# Altium footprint library Orion-Bridge.PcbLib: 20 footprints (part 1 of 2)
Each footprint in its own frame and in the unit in brackets; x right, y up, seen from the top. Pads: shape width x height; smd on the part's side, far side on the other; paste and mask are expansions set on the pad; w line width, h text height; cw(c..) or ccw(c..) is an arc to the next point about the centre after c.
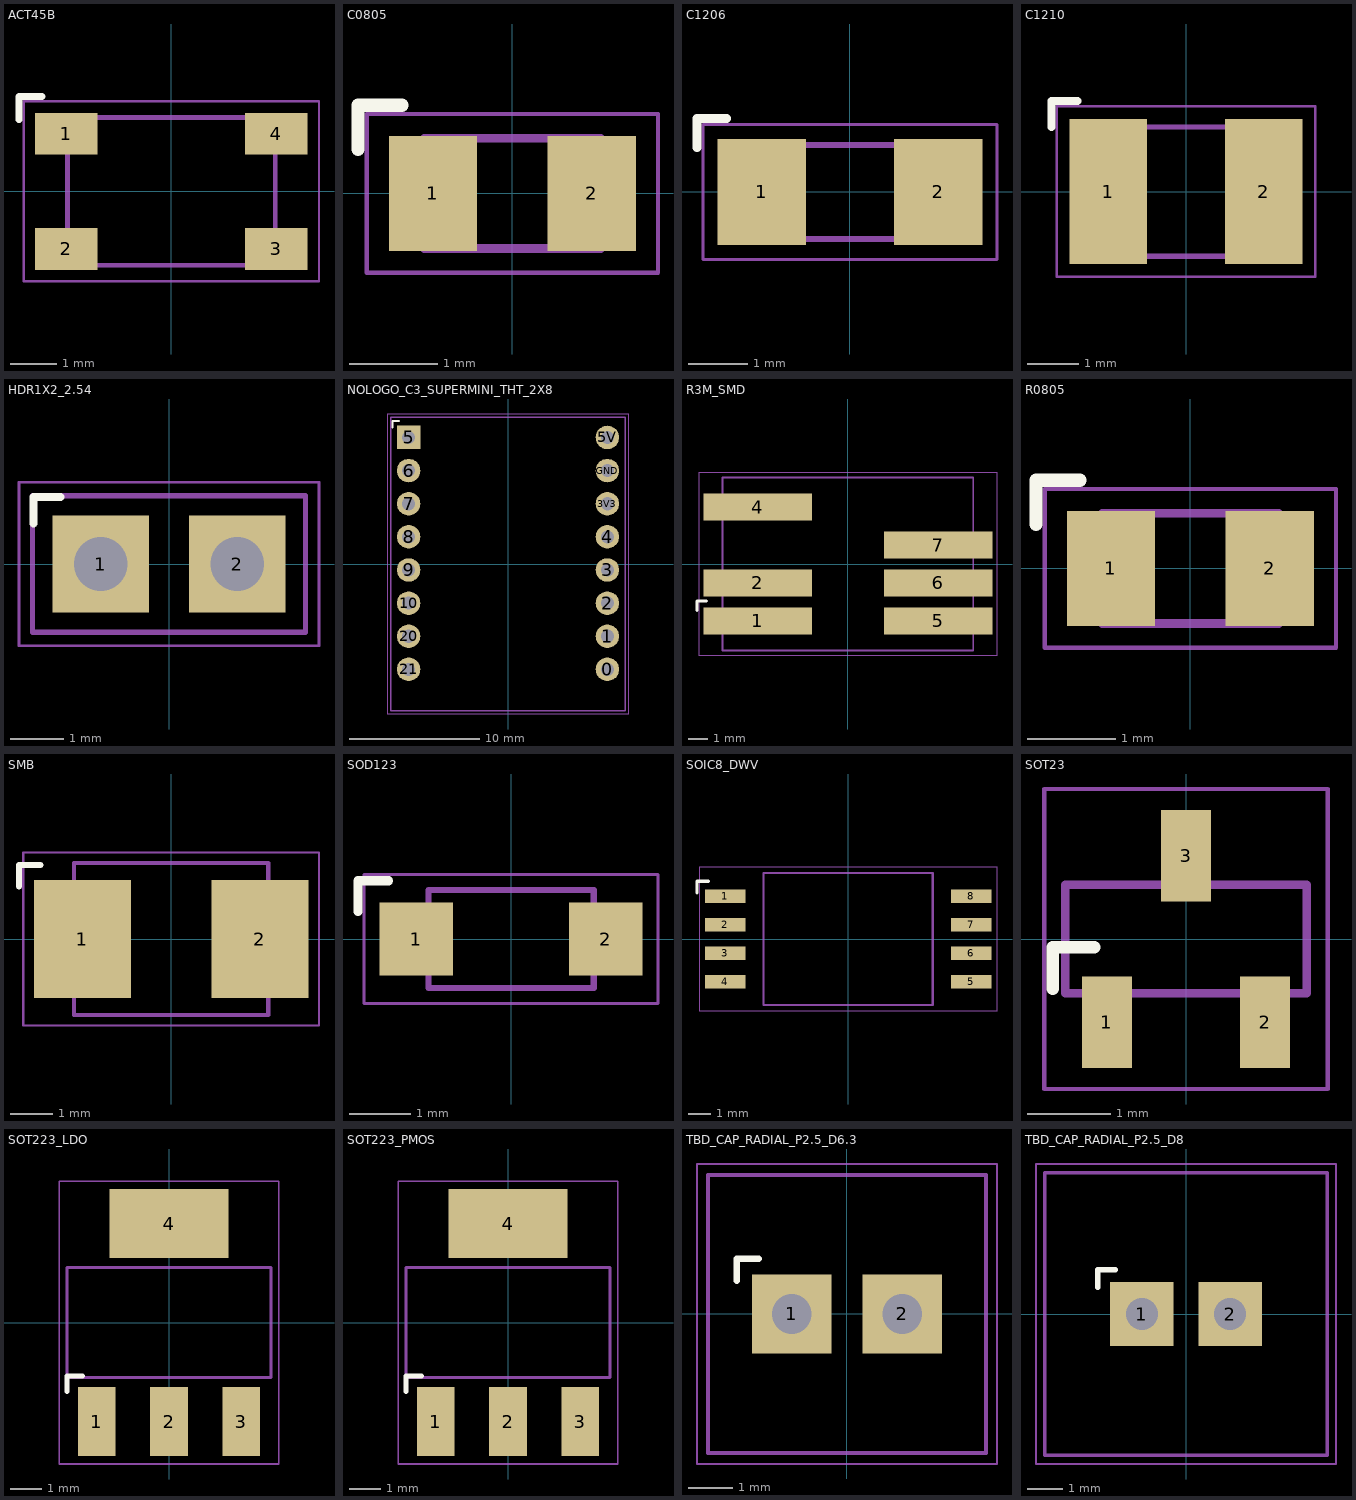
[diagram p0: the footprints below, top view; thin cyan lines are the x and y axes]

## ACT45B [mm] "TDK ACT45B recommended lands; windings 1-4 and 2-3"
height 2.8
pads (4):
  rect 1.35x0.9 smd: 1(-2.275,1.25) 2(-2.275,-1.25) 3(2.275,-1.25) 4(2.275,1.25)
Top Overlay:
  lines w0.15: -3.3,1.55 -3.3,2.05 -2.8,2.05
Component bodies:
  lines w0.1: -2.25,-1.6 2.25,-1.6 2.25,1.6 -2.25,1.6 -2.25,-1.6
Courtyards:
  lines w0.05: -3.2,-1.95 3.2,-1.95 3.2,1.95 -3.2,1.95 -3.2,-1.95

## C0805 [mm] "0805 generic capacitor lands; MPN review"
height 1.2
pads (2):
  rect 1x1.3 smd: 1(-0.9,0) 2(0.9,0)
Top Overlay:
  lines w0.15: -1.75,0.5 -1.75,1 -1.25,1
Component bodies:
  lines w0.1: -1,-0.625 1,-0.625 1,0.625 -1,0.625 -1,-0.625
Courtyards:
  lines w0.05: -1.65,-0.9 1.65,-0.9 1.65,0.9 -1.65,0.9 -1.65,-0.9

## C1206 [mm] "1206 generic capacitor lands; effective capacitance review"
height 1.6
pads (2):
  rect 1.5x1.8 smd: 1(-1.5,0) 2(1.5,0)
Top Overlay:
  lines w0.15: -2.6,0.75 -2.6,1.25 -2.1,1.25
Component bodies:
  lines w0.1: -1.6,-0.8 1.6,-0.8 1.6,0.8 -1.6,0.8 -1.6,-0.8
Courtyards:
  lines w0.05: -2.5,-1.15 2.5,-1.15 2.5,1.15 -2.5,1.15 -2.5,-1.15

## C1210 [mm] "1210 generic capacitor lands; effective capacitance review"
height 2.5
pads (2):
  rect 1.5x2.8 smd: 1(-1.5,0) 2(1.5,0)
Top Overlay:
  lines w0.15: -2.6,1.25 -2.6,1.75 -2.1,1.75
Component bodies:
  lines w0.1: -1.6,-1.25 1.6,-1.25 1.6,1.25 -1.6,1.25 -1.6,-1.25
Courtyards:
  lines w0.05: -2.5,-1.65 2.5,-1.65 2.5,1.65 -2.5,1.65 -2.5,-1.65

## HDR1X2_2.54 [mm] "TBD 2.54 mm service jumper; open BEFORE connecting USB"
height 6
pads (2):
  rect 1.8x1.8 hole 1: 1(-1.27,0) 2(1.27,0)
Top Overlay:
  lines w0.15: -2.52,0.75 -2.52,1.25 -2.02,1.25
Component bodies:
  lines w0.1: -2.54,-1.27 2.54,-1.27 2.54,1.27 -2.54,1.27 -2.54,-1.27
Courtyards:
  lines w0.05: -2.79,-1.52 2.79,-1.52 2.79,1.52 -2.79,1.52 -2.79,-1.52

## NOLOGO_C3_SUPERMINI_THT_2X8 [mm] "Nologo 16-pin interface; 15.24 mm rows / 2.54 mm pitch; carrier pads 1.8 mm / holes 1.0 mm; verify sockets"
height 12
pads (16):
  round 1.8 hole 1: 0(7.62,-8.079) 1(7.62,-5.539) 2(7.62,-2.999) 3(7.62,-0.459) 3V3(7.62,4.621) 4(7.62,2.081) 5V(7.62,9.701) 6(-7.62,7.161) 7(-7.62,4.621) 8(-7.62,2.081) 9(-7.62,-0.459) 10(-7.62,-2.999) 20(-7.62,-5.539) 21(-7.62,-8.079) GND(7.62,7.161)
  rect 1.8x1.8 hole 1: 5(-7.62,9.701)
Top Overlay:
  lines w0.15: -8.87,10.451 -8.87,10.951 -8.37,10.951
Component bodies:
  lines w0.1: -9,-11.25 9,-11.25 9,11.25 -9,11.25 -9,-11.25
Courtyards:
  lines w0.05: -9.25,-11.5 9.25,-11.5 9.25,11.5 -9.25,11.5 -9.25,-11.5

## R3M_SMD [mm] "RECOM recommended R3M SMD land pattern; 3.8 mm inner pad gap"
height 10.2
pads (6):
  rect 5.7x1.4 smd: 1(-4.75,-3) 2(-4.75,-1) 4(-4.75,3) 5(4.75,-3) 6(4.75,-1) 7(4.75,1)
Top Overlay:
  lines w0.15: -7.95,-2.45 -7.95,-1.95 -7.45,-1.95
Component bodies:
  lines w0.1: -6.6,-4.55 6.6,-4.55 6.6,4.55 -6.6,4.55 -6.6,-4.55
Courtyards:
  lines w0.05: -7.85,-4.8 7.85,-4.8 7.85,4.8 -7.85,4.8 -7.85,-4.8

## R0805 [mm] "0805 generic resistor lands; MPN review"
height 0.6
pads (2):
  rect 1x1.3 smd: 1(-0.9,0) 2(0.9,0)
Top Overlay:
  lines w0.15: -1.75,0.5 -1.75,1 -1.25,1
Component bodies:
  lines w0.1: -1,-0.625 1,-0.625 1,0.625 -1,0.625 -1,-0.625
Courtyards:
  lines w0.05: -1.65,-0.9 1.65,-0.9 1.65,0.9 -1.65,0.9 -1.65,-0.9

## SMB [mm] "DO-214AA SMB generic lands; 1=cathode 2=anode; verify vendor"
height 2.5
pads (2):
  rect 2.3x2.8 smd: 1(-2.1,0) 2(2.1,0)
Top Overlay:
  lines w0.15: -3.6,1.25 -3.6,1.75 -3.1,1.75
Component bodies:
  lines w0.1: -2.3,-1.8 2.3,-1.8 2.3,1.8 -2.3,1.8 -2.3,-1.8
Courtyards:
  lines w0.05: -3.5,-2.05 3.5,-2.05 3.5,2.05 -3.5,2.05 -3.5,-2.05

## SOD123 [mm] "SOD-123 generic lands; 1=cathode 2=anode; verify vendor"
height 1.2
pads (2):
  rect 1.2x1.2 smd: 1(-1.55,0) 2(1.55,0)
Top Overlay:
  lines w0.15: -2.5,0.45 -2.5,0.95 -2,0.95
Component bodies:
  lines w0.1: -1.35,-0.8 1.35,-0.8 1.35,0.8 -1.35,0.8 -1.35,-0.8
Courtyards:
  lines w0.05: -2.4,-1.05 2.4,-1.05 2.4,1.05 -2.4,1.05 -2.4,-1.05

## SOIC8_DWV [mm] "TI DWV0008A manufacturer land pattern; pin 1 upper left"
height 2.8
pads (8):
  rect 1.8x0.6 smd: 1(-5.45,1.905) 2(-5.45,0.635) 3(-5.45,-0.635) 4(-5.45,-1.905) 5(5.45,-1.905) 6(5.45,-0.635) 7(5.45,0.635) 8(5.45,1.905)
Top Overlay:
  lines w0.15: -6.7,2.055 -6.7,2.555 -6.2,2.555
Component bodies:
  lines w0.1: -3.75,-2.925 3.75,-2.925 3.75,2.925 -3.75,2.925 -3.75,-2.925
Courtyards:
  lines w0.05: -6.6,-3.175 6.6,-3.175 6.6,3.175 -6.6,3.175 -6.6,-3.175

## SOT23 [mm] "SOT-23 generic lands; confirm Nexperia solder process"
height 1.1
pads (3):
  rect 0.6x1.1 smd: 1(-0.95,-1) 2(0.95,-1) 3(0,1)
Top Overlay:
  lines w0.15: -1.6,-0.6 -1.6,-0.1 -1.1,-0.1
Component bodies:
  lines w0.1: -1.45,-0.65 1.45,-0.65 1.45,0.65 -1.45,0.65 -1.45,-0.65
Courtyards:
  lines w0.05: -1.7,-1.8 1.7,-1.8 1.7,1.8 -1.7,1.8 -1.7,-1.8

## SOT223_LDO [mm] "SOT-223 generic lands; confirm TI DCY / Diodes land pattern"
height 1.8
pads (4):
  rect 1.2x2.2 smd: 1(-2.3,-3.15) 2(0,-3.15) 3(2.3,-3.15)
  rect 3.8x2.2 smd: 4(0,3.15)
Top Overlay:
  lines w0.15: -3.25,-2.2 -3.25,-1.7 -2.75,-1.7
Component bodies:
  lines w0.1: -3.25,-1.75 3.25,-1.75 3.25,1.75 -3.25,1.75 -3.25,-1.75
Courtyards:
  lines w0.05: -3.5,-4.5 3.5,-4.5 3.5,4.5 -3.5,4.5 -3.5,-4.5

## SOT223_PMOS [mm] "SOT-223 generic lands; confirm TI DCY / Diodes land pattern"
height 1.8
pads (4):
  rect 1.2x2.2 smd: 1(-2.3,-3.15) 2(0,-3.15) 3(2.3,-3.15)
  rect 3.8x2.2 smd: 4(0,3.15)
Top Overlay:
  lines w0.15: -3.25,-2.2 -3.25,-1.7 -2.75,-1.7
Component bodies:
  lines w0.1: -3.25,-1.75 3.25,-1.75 3.25,1.75 -3.25,1.75 -3.25,-1.75
Courtyards:
  lines w0.05: -3.5,-4.5 3.5,-4.5 3.5,4.5 -3.5,4.5 -3.5,-4.5

## TBD_CAP_RADIAL_P2.5_D6.3 [mm] "TBD radial electrolytic 6.3 mm body, 2.5 mm pitch; 1=positive"
height 12
pads (2):
  rect 1.8x1.8 hole 0.9: 1(-1.25,0) 2(1.25,0)
Top Overlay:
  lines w0.15: -2.5,0.75 -2.5,1.25 -2,1.25
Component bodies:
  lines w0.1: -3.15,-3.15 3.15,-3.15 3.15,3.15 -3.15,3.15 -3.15,-3.15
Courtyards:
  lines w0.05: -3.4,-3.4 3.4,-3.4 3.4,3.4 -3.4,3.4 -3.4,-3.4

## TBD_CAP_RADIAL_P2.5_D8 [mm] "TBD radial electrolytic 8 mm body, 2.5 mm pitch; 1=positive"
height 12
pads (2):
  rect 1.8x1.8 hole 0.9: 1(-1.25,0) 2(1.25,0)
Top Overlay:
  lines w0.15: -2.5,0.75 -2.5,1.25 -2,1.25
Component bodies:
  lines w0.1: -4,-4 4,-4 4,4 -4,4 -4,-4
Courtyards:
  lines w0.05: -4.25,-4.25 4.25,-4.25 4.25,4.25 -4.25,4.25 -4.25,-4.25